# Altium footprint library LimeMicroAltiumLib.PcbLib: 876 footprints (part 19 of 57)
Each footprint in its own frame and in the unit in brackets; x right, y up, seen from the top. Pads: shape width x height; smd on the part's side, far side on the other; paste and mask are expansions set on the pad; w line width, h text height; cw(c..) or ccw(c..) is an arc to the next point about the centre after c.
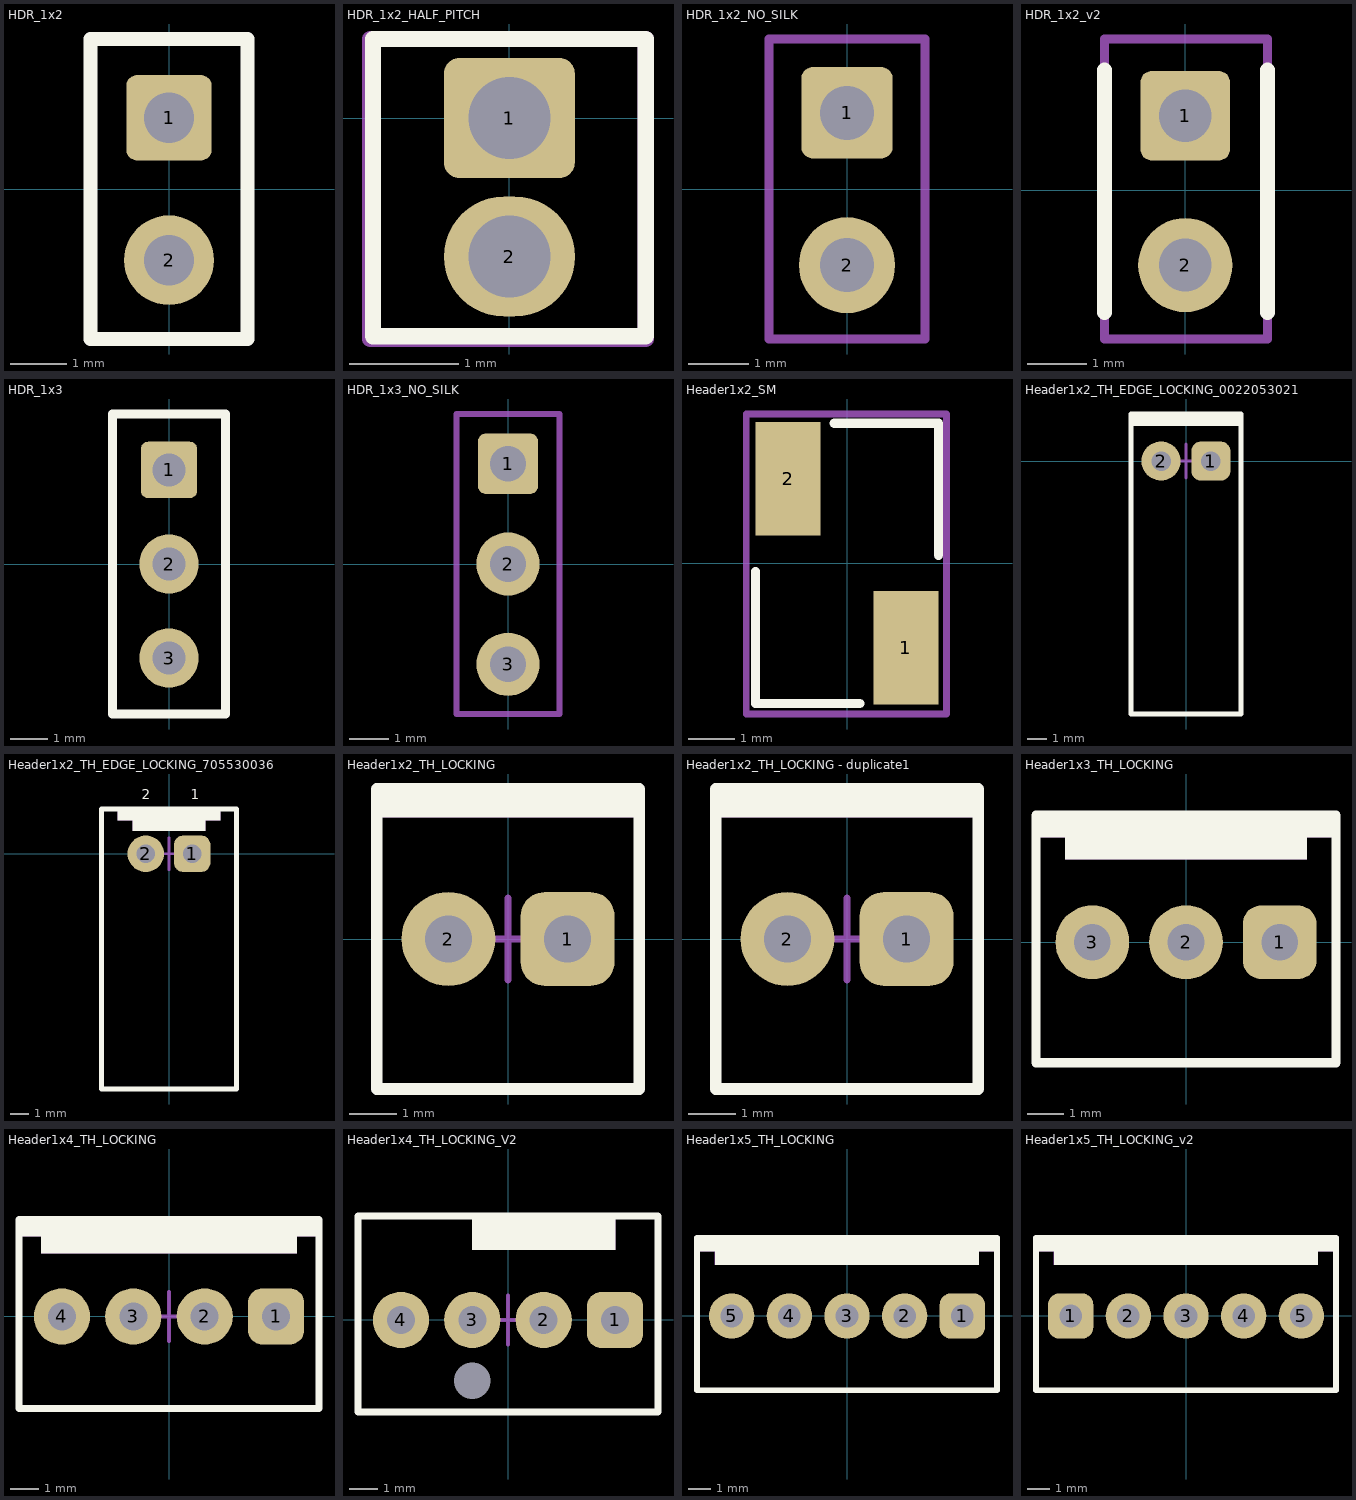
[diagram p18: the footprints below, top view; thin cyan lines are the x and y axes]

## HDR_1x2 [mm]
pads (2):
  rrect25% 1.524x1.524 hole 0.9: 1(0,1.27)
  round 1.6 hole 0.9: 2(0,-1.27)
Top Overlay:
  lines w0.254: -1.4,-2.675 1.4,-2.675 1.4,2.675 -1.4,2.675 -1.4,-2.675
Mechanical 15:
  lines w0.15: -1.4,-2.675 1.4,-2.675 1.4,2.675 -1.4,2.675 -1.4,-2.675
  text ".Designator" at 0,0 h0.55
3D body "65775.stp": height 8.54, standoff -3, extent -1.27,-2.54 1.27,0
3D body "65775.stp": height 8.54, standoff -3, extent -1.27,0 1.27,2.54

## HDR_1x2_HALF_PITCH [mm] "1.27 pitch"
pads (2):
  rrect25% 1.2x1.1 hole 0.75 mask+0.05: 1(0,0)
  oval 1.2x1.1 hole 0.75 mask+0.05: 2(0,-1.27)
Top Overlay:
  lines w0.15: -1.25,-2 1.25,-2 1.25,0.725 -1.25,0.725 -1.25,-2
Mechanical 15:
  lines w0.15: -1.275,-2.025 1.25,-2.025 1.25,0.725 -1.275,0.725 -1.275,-2.025
  text ".Designator" at 0,-1.27 h0.55
3D body "User Library-PinHeader1_27_2.STEP": height 5, standoff -2.3, extent -1.2,-1.905 1.2,0.635

## HDR_1x2_NO_SILK [mm]
pads (2):
  rrect25% 1.524x1.524 hole 0.9: 1(0,1.27)
  round 1.6 hole 0.9: 2(0,-1.27)
Mechanical 15:
  lines w0.15: -1.3,-2.5 1.3,-2.5 1.3,2.5 -1.3,2.5 -1.3,-2.5
  text ".Designator" at 0,0 h0.55
3D body "65775.stp": height 8.54, standoff -3, extent -1.27,-2.54 1.27,0
3D body "65775.stp": height 8.54, standoff -3, extent -1.27,0 1.27,2.54

## HDR_1x2_v2 [mm]
pads (2):
  rrect25% 1.524x1.524 hole 0.9: 1(0,1.27)
  round 1.6 hole 0.9: 2(0,-1.27)
Top Overlay:
  lines w0.254: -1.375,-2.075 -1.375,2.05 ; 1.4,-2.075 1.4,2.05
Mechanical 15:
  lines w0.15: -1.375,-2.525 -1.375,2.575 1.4,2.575 1.4,-2.525 -1.375,-2.525
  text ".Designator" at 0,0 h0.55
3D body "65775.stp": height 8.54, standoff -3, extent -1.27,0 1.27,2.54
3D body "65775.stp": height 8.54, standoff -3, extent -1.27,-2.54 1.27,0

## HDR_1x3 [mm]
pads (3):
  rrect25% 1.524x1.524 hole 0.9: 1(0,2.54)
  round 1.6 hole 0.9: 2(0,0) 3(0,-2.54)
Top Overlay:
  lines w0.254: -1.525,-4.05 -1.525,4.05 1.525,4.05 1.525,-4.05 -1.525,-4.05
Mechanical 15:
  lines w0.15: -1.525,-4.05 -1.525,4.05 1.525,4.05 1.525,-4.05 -1.525,-4.05
  text ".Designator" at 0,0 h0.55
3D body "65775.stp": height 8.54, standoff -3, extent -1.27,-3.81 1.27,-1.27
3D body "65775.stp": height 8.54, standoff -3, extent -1.27,-1.27 1.27,1.27
3D body "65775.stp": height 8.54, standoff -3, extent -1.27,1.27 1.27,3.81

## HDR_1x3_NO_SILK [mm]
pads (3):
  rrect25% 1.524x1.524 hole 0.9: 1(0,2.54)
  round 1.6 hole 0.9: 2(0,0) 3(0,-2.54)
Mechanical 15:
  lines w0.15: -1.3,-3.8 1.3,-3.8 1.3,3.8 -1.3,3.8 -1.3,-3.8
  text ".Designator" at 0,0 h0.55
3D body "65775.stp": height 8.54, standoff -3, extent -1.27,1.27 1.27,3.81
3D body "65775.stp": height 8.54, standoff -3, extent -1.27,-1.27 1.27,1.27
3D body "65775.stp": height 8.54, standoff -3, extent -1.27,-3.81 1.27,-1.27

## Header1x2_SM [mm]
pads (2):
  rect 1.4x2.45 smd: 1(1.27,-1.825) 2(-1.27,1.825)
Top Overlay:
  lines w0.2: -1.975,-0.175 -1.975,-3.025 0.275,-3.025 ; -0.275,3.025 1.975,3.025 1.975,0.175
Mechanical 15:
  lines w0.15: -2.175,-3.25 -2.175,3.225 2.15,3.225 2.15,-3.25 -2.175,-3.25
  text ".Designator" at -0.05,0.175 h0.55

## Header1x2_TH_EDGE_LOCKING_0022053021 [mm]
pads (2):
  rrect50% 2x2 hole 1: 1(1.271,0)
  round 2 hole 1: 2(-1.271,0)
Top Overlay:
  region: -2.8,2.4 -2.8,1.8 2.8,1.8 2.8,2.4
  lines w0.254: -2.8,-12.9 2.8,-12.9 2.8,2.4 -2.8,2.4 -2.8,-12.9
Mechanical 15:
  region: -2.8,2.4 -2.8,1.8 2.8,1.8 2.8,2.4
  lines w0.15: -0.875,0 0,0 ; 0,-0.875 0,0 ; 0,0.875 0,0 ; 0.875,0 0,0 ; -2.8,-12.9 -2.8,2.4 2.8,2.4 2.8,-12.9 -2.8,-12.9
  text ".Designator" at 0,0 h0.55
  text "KEY" at -0.7,1.1 h0.55
  text "1" at 1.125,-1 h0.55
3D body "022053021.stp": height 6.48, standoff -3.46, extent -2.464,-12.593 2.464,0.336

## Header1x2_TH_EDGE_LOCKING_705530036 [mm]
pads (2):
  rrect50% 2x2 hole 1: 1(1.271,0)
  round 2 hole 1: 2(-1.271,0)
Top Overlay:
  region: 0,1.25 0,1.85 -2,1.85 -2,1.25
  region: 0,1.25 0,1.85 2,1.85 2,1.25
  region: -2.8,2.45 -2.8,1.85 2.8,1.85 2.8,2.45
  lines w0.254: -3.7,-12.9 3.7,-12.9 3.7,2.45 -3.7,2.45 -3.7,-12.9
  text "1" at 1.2,3 h0.55
  text "2" at -1.5,3 h0.55
Mechanical 15:
  region: -2,1.25 -2,1.85 2,1.85 2,1.25
  region: -2.8,2.45 -2.8,1.85 2.8,1.85 2.8,2.45
  lines w0.15: -0.875,0 0,0 ; 0,-0.875 0,0 ; 0,0.875 0,0 ; 0.875,0 0,0 ; -3.7,-12.9 -3.7,2.45 3.7,2.45 3.7,-12.9 -3.7,-12.9
  text ".Designator" at 0,0 h0.55
  text "KEY" at -0.675,1.475 h0.55
  text "1" at 1.125,-1 h0.55
3D body "0705530036.stp": height 7.06, standoff -3.22, extent -3.683,-12.851 3.683,0.738

## Header1x2_TH_LOCKING [mm]
pads (2):
  rrect50% 2x2 hole 1: 1(1.271,0)
  round 2 hole 1: 2(-1.271,0)
Top Overlay:
  region: -2.8,3.2 -2.8,2.6 2.8,2.6 2.8,3.2
  lines w0.254: -2.8,-3.2 -2.8,3.2 2.8,3.2 2.8,-3.2 -2.8,-3.2
Mechanical 15:
  region: -2.8,3.2 -2.8,2.6 2.8,2.6 2.8,3.2
  lines w0.15: -0.875,0 0,0 ; 0,-0.875 0,0 ; 0,0.875 0,0 ; 0.875,0 0,0 ; -2.8,-3.2 2.8,-3.2 2.8,3.2 -2.8,3.2 -2.8,-3.2
  text "1" at 1.125,-1 h0.55
  text "KEY" at -0.7,1.8 h0.55
  text ".Designator" at 0,0 h0.55
3D body "022292021.stp": height 11.52, standoff -3.74, extent -2.54,-2.9 2.54,2.9

## Header1x2_TH_LOCKING - duplicate1 [mm]
pads (2):
  rrect50% 2x2 hole 1: 1(1.271,0)
  round 2 hole 1: 2(-1.271,0)
Top Overlay:
  region: -2.8,3.2 -2.8,2.6 2.8,2.6 2.8,3.2
  lines w0.254: -2.8,-3.2 2.8,-3.2 2.8,3.2 -2.8,3.2 -2.8,-3.2
Mechanical 15:
  region: -2.8,3.2 -2.8,2.6 2.8,2.6 2.8,3.2
  lines w0.15: -0.875,0 0,0 ; 0,-0.875 0,0 ; 0,0.875 0,0 ; 0.875,0 0,0 ; -2.8,-3.2 -2.8,3.2 2.8,3.2 2.8,-3.2 -2.8,-3.2
  text ".Designator" at 0,0 h0.55
  text "KEY" at -0.7,1.8 h0.55
  text "1" at 1.125,-1 h0.55
3D body "022292021.stp": height 11.52, standoff -3.74, extent -2.54,-2.9 2.54,2.9

## Header1x3_TH_LOCKING [mm]
pads (3):
  rrect50% 2x2 hole 1: 1(2.543,0)
  round 2 hole 1: 2(0,0) 3(-2.543,0)
Top Overlay:
  region: -4.071,3.45 -4.071,2.85 4.071,2.85 4.071,3.45
  region: 0,2.25 0,2.85 3.271,2.85 3.271,2.25
  region: 0,2.25 0,2.85 -3.271,2.85 -3.271,2.25
  lines w0.254: -4.071,-3.275 -4.071,3.45 4.071,3.45 4.071,-3.275 -4.071,-3.275
Mechanical 15:
  region: 0,2.25 0,2.85 3.271,2.85 3.271,2.25
  region: -4.071,3.45 -4.071,2.85 4.071,2.85 4.071,3.45
  region: 0,2.25 0,2.85 -3.271,2.85 -3.271,2.25
  lines w0.15: -4.071,-3.275 -4.071,3.45 4.071,3.45 4.071,-3.275 -1.529,-3.275 ; -0.875,0 0,0 ; 0,-0.875 0,0 ; 0,0.875 0,0 ; 0.875,0 0,0
  text ".Designator" at 0,0 h0.55
  text "KEY" at -0.7,1.475 h0.55
  text "1" at 2.396,-1 h0.55
3D body "022292021.stp": height 11.52, standoff -3.74, extent -3.811,-2.9 1.269,2.9
3D body "022292021.stp": height 11.52, standoff -3.74, extent -1.268,-2.9 3.812,2.9

## Header1x4_TH_LOCKING [mm]
pads (4):
  rrect50% 2x2 hole 1: 1(3.814,0)
  round 2 hole 1: 2(1.271,0) 3(-1.271,0) 4(-3.814,0)
Top Overlay:
  region: 4.543,2.25 4.543,2.85 -4.554,2.85 -4.554,2.25
  region: -5.343,3.45 -5.343,2.85 5.343,2.85 5.343,3.45
  lines w0.254: -5.343,-3.275 5.343,-3.275 5.343,3.45 -5.343,3.45 -5.343,-3.275
Mechanical 15:
  region: 4.546,2.25 4.546,2.85 -4.554,2.85 -4.554,2.25
  region: -5.343,3.45 -5.343,2.85 5.343,2.85 5.343,3.45
  lines w0.15: -0.875,0 0,0 ; 0,-0.875 0,0 ; 0,0.875 0,0 ; 0.875,0 0,0 ; -5.343,-3.275 5.343,-3.275 5.343,3.45 -5.343,3.45 -5.343,-3.275
  text ".Designator" at 0,0 h0.55
  text "KEY" at -0.7,1.475 h0.55
  text "1" at 3.668,-1 h0.55
3D body "022292021.stp": height 11.52, standoff -3.74, extent 0.003,-2.9 5.083,2.9
3D body "022292021.stp": height 11.52, standoff -3.74, extent -2.54,-2.9 2.54,2.9
3D body "022292021.stp": height 11.52, standoff -3.74, extent -5.083,-2.9 -0.003,2.9

## Header1x4_TH_LOCKING_V2 [mm]
pads (5):
  round 0.25 hole 1.3 unplated mask+0.05: 0(-1.271,-2.16)
  rrect50% 2x2 hole 1: 1(3.814,0)
  round 2 hole 1: 2(1.271,0) 3(-1.271,0) 4(-3.814,0)
Top Overlay:
  region: 3.814,2.5 3.814,3.7 -1.271,3.7 -1.271,2.5
  lines w0.254: -5.343,-3.275 5.343,-3.275 5.343,3.7 -5.343,3.7 -5.343,-3.275
Mechanical 15:
  region: 3.814,2.5 3.814,3.7 -1.271,3.7 -1.271,2.5
  lines w0.15: -0.875,0 0,0 ; 0,-0.875 0,0 ; 0,0.875 0,0 ; 0.875,0 0,0 ; -5.343,-3.275 5.343,-3.275 5.343,3.7 -5.343,3.7 -5.343,-3.275
  text ".Designator" at 0,0 h0.55
  text "KEY" at 0.575,1.725 h0.55
  text "1" at 3.668,-1 h0.55
3D body "470533000.stp": height 9.84, standoff -4, extent -5.1,-2.54 5.1,3.3

## Header1x5_TH_LOCKING [mm]
pads (5):
  rrect50% 2x2 hole 1: 1(5.086,0)
  round 2 hole 1: 2(2.543,0) 3(0,0) 4(-2.543,0) 5(-5.086,0)
Top Overlay:
  region: 5.814,2.25 5.814,2.85 -5.814,2.85 -5.814,2.25
  region: -6.614,3.45 -6.614,2.85 6.614,2.85 6.614,3.45
  lines w0.254: -6.614,-3.275 6.614,-3.275 6.614,3.45 -6.614,3.45 -6.614,-3.275
Mechanical 15:
  region: 5.818,2.25 5.818,2.85 -5.829,2.85 -5.829,2.25
  region: -6.614,3.45 -6.614,2.85 6.614,2.85 6.614,3.45
  lines w0.15: -0.875,0 0,0 ; 0,-0.875 0,0 ; 0,0.875 0,0 ; 0.875,0 0,0 ; -6.614,-3.275 6.614,-3.275 6.614,3.45 -6.614,3.45 -6.614,-3.275
  text ".Designator" at 0,0 h0.55
  text "1" at 4.939,-1 h0.55
  text "KEY" at -0.779,1.475 h0.55
3D body "022292021.stp": height 11.52, standoff -3.74, extent 1.274,-2.9 6.354,2.9
3D body "022292021.stp": height 11.52, standoff -3.74, extent -1.268,-2.9 3.812,2.9
3D body "022292021.stp": height 11.52, standoff -3.74, extent -6.354,-2.9 -1.274,2.9
3D body "022292021.stp": height 11.52, standoff -3.74, extent -3.811,-2.9 1.269,2.9

## Header1x5_TH_LOCKING_v2 [mm]
pads (5):
  rrect50% 2x2 hole 1: 1(-5.086,0)
  round 2 hole 1: 2(-2.543,0) 3(0,0) 4(2.543,0) 5(5.086,0)
Top Overlay:
  region: 5.814,2.25 5.814,2.85 -5.814,2.85 -5.814,2.25
  region: -6.614,3.45 -6.614,2.85 6.614,2.85 6.614,3.45
  lines w0.254: -6.614,-3.275 6.614,-3.275 6.614,3.45 -6.614,3.45 -6.614,-3.275
Mechanical 15:
  region: 5.818,2.25 5.818,2.85 -5.829,2.85 -5.829,2.25
  region: -6.614,3.45 -6.614,2.85 6.614,2.85 6.614,3.45
  lines w0.15: -0.875,0 0,0 ; 0,-0.875 0,0 ; 0,0.875 0,0 ; 0.875,0 0,0 ; -6.614,-3.275 6.614,-3.275 6.614,3.45 -6.614,3.45 -6.614,-3.275
  text ".Designator" at 0,0 h0.55
  text "1" at -5.2,-0.2 h0.55
  text "KEY" at -0.779,1.475 h0.55
3D body "022292021.stp": height 11.52, standoff -3.74, extent 1.274,-2.9 6.354,2.9
3D body "022292021.stp": height 11.52, standoff -3.74, extent -1.268,-2.9 3.812,2.9
3D body "022292021.stp": height 11.52, standoff -3.74, extent -6.354,-2.9 -1.274,2.9
3D body "022292021.stp": height 11.52, standoff -3.74, extent -3.811,-2.9 1.269,2.9